# Altium footprint library Connector Power.PcbLib: 83 footprints (part 2 of 6)
Each footprint in its own frame and in the unit in brackets; x right, y up, seen from the top. Pads: shape width x height; smd on the part's side, far side on the other; paste and mask are expansions set on the pad; w line width, h text height; cw(c..) or ccw(c..) is an arc to the next point about the centre after c.
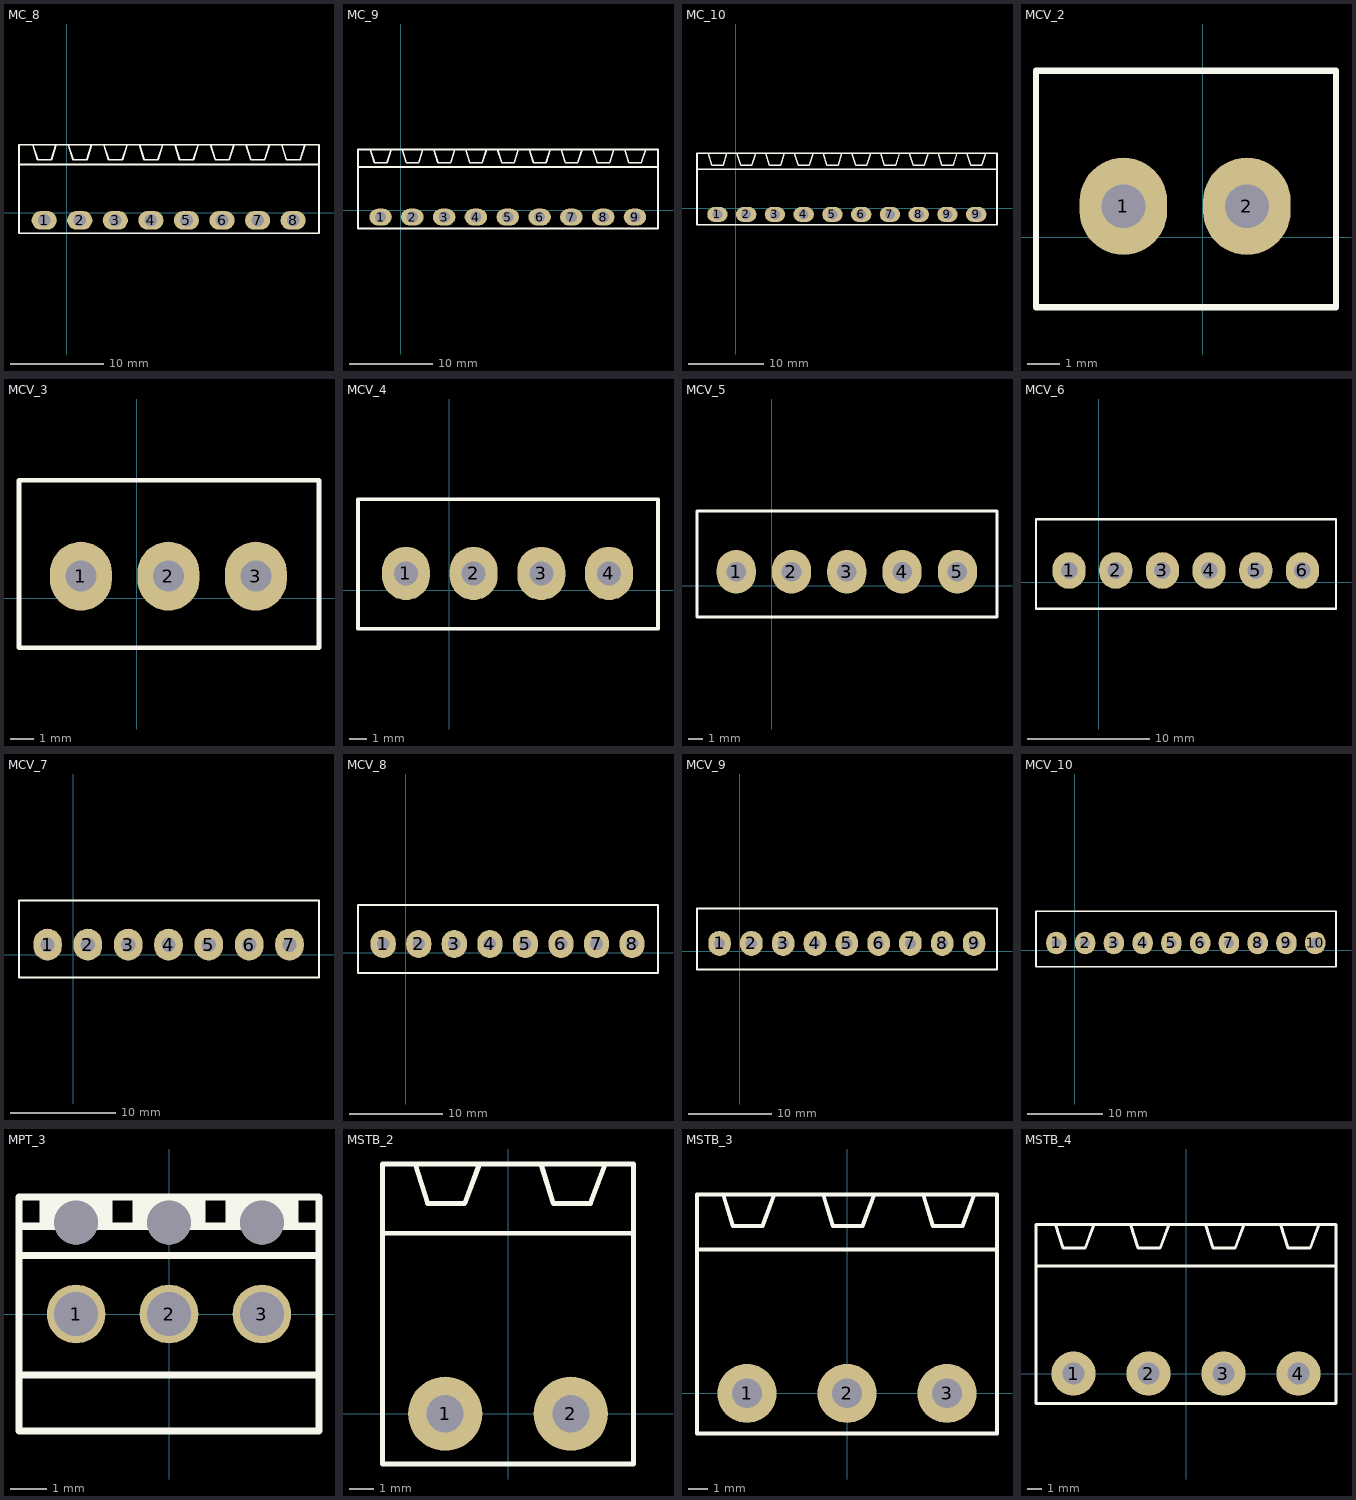
[diagram p1: the footprints below, top view; thin cyan lines are the x and y axes]

## MC_8 [mm] "PHOENIX MC 1.5/8-GF-3.81"
pads (8):
  oval 2.7x2 hole 1.35: 1(-2.44,-0.8) 2(1.37,-0.8) 3(5.18,-0.8) 4(8.99,-0.8) 5(12.8,-0.8) 6(16.61,-0.8) 7(20.42,-0.8) 8(24.23,-0.8)
Top Overlay:
  lines w0.2: -5.08,5.2 26.99,5.2 ; -3.67,7.3 -3.17,5.7 -1.67,5.7 -1.17,7.3 ; 0.14,7.3 0.64,5.7 2.14,5.7 2.64,7.3 ; 3.95,7.3 4.45,5.7 5.95,5.7 6.45,7.3 ; 7.76,7.3 8.26,5.7 9.76,5.7 10.26,7.3 ; 11.57,7.3 12.07,5.7 13.57,5.7 14.07,7.3 ; 15.38,7.3 15.88,5.7 17.38,5.7 17.88,7.3 ; 19.19,7.3 19.69,5.7 21.19,5.7 21.69,7.3 ; 23,7.3 23.5,5.7 25,5.7 25.5,7.3 ; -5.14,-2.18 27,-2.18 27,7.3 -5.14,7.3 -5.14,-2.18
3D body "User Library-1803277.STEP": height 7.35, standoff -3.3, extent 10.235,-2.1 19.245,7.2
3D body "User Library-1803277.STEP": height 7.35, standoff -3.3, extent -1.195,-2.1 7.815,7.2
3D body "User Library-1803277.STEP": height 7.35, standoff -3.3, extent -5.005,-2.1 4.005,7.2
3D body "User Library-1803277.STEP": height 7.35, standoff -3.3, extent 2.615,-2.1 11.625,7.2
3D body "User Library-1803277.STEP": height 7.35, standoff -3.3, extent 6.425,-2.1 15.435,7.2
3D body "User Library-1803277.STEP": height 7.35, standoff -3.3, extent 14.045,-2.1 23.055,7.2
3D body "User Library-1803277.STEP": height 7.35, standoff -3.3, extent 17.855,-2.1 26.865,7.2

## MC_9 [mm] "PHOENIX MC 1.5/9-GF-3.81"
pads (9):
  oval 2.7x2 hole 1.35: 1(-2.44,-0.8) 2(1.37,-0.8) 3(5.18,-0.8) 4(8.99,-0.8) 5(12.8,-0.8) 6(16.61,-0.8) 7(20.42,-0.8) 8(24.23,-0.8) 9(28.04,-0.8)
Top Overlay:
  lines w0.2: -5.08,5.2 30.79,5.2 ; -3.67,7.3 -3.17,5.7 -1.67,5.7 -1.17,7.3 ; 0.14,7.3 0.64,5.7 2.14,5.7 2.64,7.3 ; 3.95,7.3 4.45,5.7 5.95,5.7 6.45,7.3 ; 7.76,7.3 8.26,5.7 9.76,5.7 10.26,7.3 ; 11.57,7.3 12.07,5.7 13.57,5.7 14.07,7.3 ; 15.38,7.3 15.88,5.7 17.38,5.7 17.88,7.3 ; 19.19,7.3 19.69,5.7 21.19,5.7 21.69,7.3 ; 23,7.3 23.5,5.7 25,5.7 25.5,7.3 ; 26.81,7.3 27.31,5.7 28.81,5.7 29.31,7.3 ; -5.14,-2.18 -5.14,7.3 30.8,7.3 30.8,-2.18 -5.14,-2.18
3D body "User Library-1803277.STEP": height 7.35, standoff -3.3, extent 17.855,-2.1 26.865,7.2
3D body "User Library-1803277.STEP": height 7.35, standoff -3.3, extent 14.045,-2.1 23.055,7.2
3D body "User Library-1803277.STEP": height 7.35, standoff -3.3, extent 6.425,-2.1 15.435,7.2
3D body "User Library-1803277.STEP": height 7.35, standoff -3.3, extent 2.615,-2.1 11.625,7.2
3D body "User Library-1803277.STEP": height 7.35, standoff -3.3, extent -5.005,-2.1 4.005,7.2
3D body "User Library-1803277.STEP": height 7.35, standoff -3.3, extent -1.195,-2.1 7.815,7.2
3D body "User Library-1803277.STEP": height 7.35, standoff -3.3, extent 10.235,-2.1 19.245,7.2
3D body "User Library-1803277.STEP": height 7.35, standoff -3.3, extent 21.665,-2.1 30.675,7.2

## MC_10 [mm] "PHOENIX MC 1.5/10-GF-3.81"
pads (10):
  oval 2.7x2 hole 1.35: 1(-2.44,-0.8) 2(1.37,-0.8) 3(5.18,-0.8) 4(8.99,-0.8) 5(12.8,-0.8) 6(16.61,-0.8) 7(20.42,-0.8) 8(24.23,-0.8) 9(28.04,-0.8) 9(31.85,-0.8)
Top Overlay:
  lines w0.2: -5.08,5.2 34.6,5.2 ; -3.67,7.3 -3.17,5.7 -1.67,5.7 -1.17,7.3 ; 0.14,7.3 0.64,5.7 2.14,5.7 2.64,7.3 ; 3.95,7.3 4.45,5.7 5.95,5.7 6.45,7.3 ; 7.76,7.3 8.26,5.7 9.76,5.7 10.26,7.3 ; 11.57,7.3 12.07,5.7 13.57,5.7 14.07,7.3 ; 15.38,7.3 15.88,5.7 17.38,5.7 17.88,7.3 ; 19.19,7.3 19.69,5.7 21.19,5.7 21.69,7.3 ; 23,7.3 23.5,5.7 25,5.7 25.5,7.3 ; 26.81,7.3 27.31,5.7 28.81,5.7 29.31,7.3 ; 30.62,7.3 31.12,5.7 32.62,5.7 33.12,7.3 ; -5.14,-2.18 34.61,-2.18 34.61,7.3 -5.14,7.3 -5.14,-2.18
3D body "User Library-1803277.STEP": height 7.35, standoff -3.3, extent 21.665,-2.1 30.675,7.2
3D body "User Library-1803277.STEP": height 7.35, standoff -3.3, extent 10.235,-2.1 19.245,7.2
3D body "User Library-1803277.STEP": height 7.35, standoff -3.3, extent -1.195,-2.1 7.815,7.2
3D body "User Library-1803277.STEP": height 7.35, standoff -3.3, extent -5.005,-2.1 4.005,7.2
3D body "User Library-1803277.STEP": height 7.35, standoff -3.3, extent 2.615,-2.1 11.625,7.2
3D body "User Library-1803277.STEP": height 7.35, standoff -3.3, extent 6.425,-2.1 15.435,7.2
3D body "User Library-1803277.STEP": height 7.35, standoff -3.3, extent 14.045,-2.1 23.055,7.2
3D body "User Library-1803277.STEP": height 7.35, standoff -3.3, extent 17.855,-2.1 26.865,7.2
3D body "User Library-1803277.STEP": height 7.35, standoff -3.3, extent 25.475,-2.1 34.485,7.2

## MCV_2 [mm] "PHOENIX MCV 1.5/2-GF-3.81"
pads (2):
  oval 2.7x3 hole 1.35: 1(-2.44,0.96) 2(1.37,0.96)
Top Overlay:
  lines w0.2: -5.14,-2.16 -5.14,5.14 4.12,5.14 4.12,-2.16 -5.14,-2.16
3D body "User Library-CO2-3_81.STEP": height 9.3, standoff -3.3, extent -5.02,-2.04 3.99,5.21

## MCV_3 [mm] "PHOENIX MCV 1.5/3-GF-3.81"
pads (3):
  oval 2.7x3 hole 1.35: 1(-2.44,0.96) 2(1.37,0.96) 3(5.18,0.96)
Top Overlay:
  lines w0.2: -5.14,-2.16 7.93,-2.16 7.93,5.14 -5.14,5.14 -5.14,-2.16
3D body "User Library-CO2-3_81.STEP": height 9.3, standoff -3.3, extent -5.02,-2.04 3.99,5.21
3D body "User Library-CO2-3_81.STEP": height 9.3, standoff -3.3, extent -1.21,-2.04 7.8,5.21

## MCV_4 [mm] "PHOENIX MCV 1.5/4-GF-3.81"
pads (4):
  oval 2.7x3 hole 1.35: 1(-2.44,0.96) 2(1.37,0.96) 3(5.18,0.96) 4(8.99,0.96)
Top Overlay:
  lines w0.2: -5.14,-2.16 -5.14,5.14 11.75,5.14 11.75,-2.16 -5.14,-2.16
3D body "User Library-CO2-3_81.STEP": height 9.3, standoff -3.3, extent -1.21,-2.04 7.8,5.21
3D body "User Library-CO2-3_81.STEP": height 9.3, standoff -3.3, extent -5.02,-2.04 3.99,5.21
3D body "User Library-CO2-3_81.STEP": height 9.3, standoff -3.3, extent 2.6,-2.04 11.61,5.21

## MCV_5 [mm] "PHOENIX MCV 1.5/5-GF-3.81"
pads (5):
  oval 2.7x3 hole 1.35: 1(-2.44,0.96) 2(1.37,0.96) 3(5.18,0.96) 4(8.99,0.96) 5(12.8,0.96)
Top Overlay:
  lines w0.2: -5.14,-2.16 -5.14,5.14 15.53,5.14 15.53,-2.16 -5.14,-2.16
3D body "User Library-CO2-3_81.STEP": height 9.3, standoff -3.3, extent 6.41,-2.04 15.42,5.21
3D body "User Library-CO2-3_81.STEP": height 9.3, standoff -3.3, extent -1.21,-2.04 7.8,5.21
3D body "User Library-CO2-3_81.STEP": height 9.3, standoff -3.3, extent -5.02,-2.04 3.99,5.21
3D body "User Library-CO2-3_81.STEP": height 9.3, standoff -3.3, extent 2.6,-2.04 11.61,5.21

## MCV_6 [mm] "PHOENIX MCV 1.5/6-GF-3.81"
pads (6):
  oval 2.7x3 hole 1.35: 1(-2.44,0.96) 2(1.37,0.96) 3(5.18,0.96) 4(8.99,0.96) 5(12.8,0.96) 6(16.61,0.96)
Top Overlay:
  lines w0.2: -5.14,-2.16 -5.14,5.14 19.35,5.14 19.35,-2.16 -5.14,-2.16
3D body "User Library-CO2-3_81.STEP": height 9.3, standoff -3.3, extent 10.22,-2.04 19.23,5.21
3D body "User Library-CO2-3_81.STEP": height 9.3, standoff -3.3, extent 6.41,-2.04 15.42,5.21
3D body "User Library-CO2-3_81.STEP": height 9.3, standoff -3.3, extent -1.21,-2.04 7.8,5.21
3D body "User Library-CO2-3_81.STEP": height 9.3, standoff -3.3, extent -5.02,-2.04 3.99,5.21
3D body "User Library-CO2-3_81.STEP": height 9.3, standoff -3.3, extent 2.6,-2.04 11.61,5.21

## MCV_7 [mm] "PHOENIX MCV 1.5/7-GF-3.81"
pads (7):
  oval 2.7x3 hole 1.35: 1(-2.44,0.96) 2(1.37,0.96) 3(5.18,0.96) 4(8.99,0.96) 5(12.8,0.96) 6(16.61,0.96) 7(20.42,0.96)
Top Overlay:
  lines w0.2: -5.14,-2.16 23.21,-2.16 23.21,5.14 -5.14,5.14 -5.14,-2.16
3D body "User Library-CO2-3_81.STEP": height 9.3, standoff -3.3, extent 2.6,-2.04 11.61,5.21
3D body "User Library-CO2-3_81.STEP": height 9.3, standoff -3.3, extent -5.02,-2.04 3.99,5.21
3D body "User Library-CO2-3_81.STEP": height 9.3, standoff -3.3, extent -1.21,-2.04 7.8,5.21
3D body "User Library-CO2-3_81.STEP": height 9.3, standoff -3.3, extent 6.41,-2.04 15.42,5.21
3D body "User Library-CO2-3_81.STEP": height 9.3, standoff -3.3, extent 10.22,-2.04 19.23,5.21
3D body "User Library-CO2-3_81.STEP": height 9.3, standoff -3.3, extent 14.03,-2.04 23.04,5.21

## MCV_8 [mm] "PHOENIX MCV 1.5/8-GF-3.81"
pads (8):
  oval 2.7x3 hole 1.35: 1(-2.44,0.96) 2(1.37,0.96) 3(5.18,0.96) 4(8.99,0.96) 5(12.8,0.96) 6(16.61,0.96) 7(20.42,0.96) 8(24.23,0.96)
Top Overlay:
  lines w0.2: -5.14,-2.16 -5.14,5.14 27.01,5.14 27.01,-2.16 -5.14,-2.16
3D body "User Library-CO2-3_81.STEP": height 9.3, standoff -3.3, extent 14.03,-2.04 23.04,5.21
3D body "User Library-CO2-3_81.STEP": height 9.3, standoff -3.3, extent 10.22,-2.04 19.23,5.21
3D body "User Library-CO2-3_81.STEP": height 9.3, standoff -3.3, extent 6.41,-2.04 15.42,5.21
3D body "User Library-CO2-3_81.STEP": height 9.3, standoff -3.3, extent -1.21,-2.04 7.8,5.21
3D body "User Library-CO2-3_81.STEP": height 9.3, standoff -3.3, extent -5.02,-2.04 3.99,5.21
3D body "User Library-CO2-3_81.STEP": height 9.3, standoff -3.3, extent 2.6,-2.04 11.61,5.21
3D body "User Library-CO2-3_81.STEP": height 9.3, standoff -3.3, extent 17.84,-2.04 26.85,5.21

## MCV_9 [mm] "PHOENIX MCV 1.5/9-GF-3.81"
pads (9):
  oval 2.7x3 hole 1.35: 1(-2.44,0.96) 2(1.37,0.96) 3(5.18,0.96) 4(8.99,0.96) 5(12.8,0.96) 6(16.61,0.96) 7(20.42,0.96) 8(24.23,0.96) 9(28.04,0.96)
Top Overlay:
  lines w0.2: -5.14,-2.16 -5.14,5.14 30.79,5.14 30.79,-2.16 -5.14,-2.16
3D body "User Library-CO2-3_81.STEP": height 9.3, standoff -3.3, extent 21.65,-2.04 30.66,5.21
3D body "User Library-CO2-3_81.STEP": height 9.3, standoff -3.3, extent 14.03,-2.04 23.04,5.21
3D body "User Library-CO2-3_81.STEP": height 9.3, standoff -3.3, extent 10.22,-2.04 19.23,5.21
3D body "User Library-CO2-3_81.STEP": height 9.3, standoff -3.3, extent 6.41,-2.04 15.42,5.21
3D body "User Library-CO2-3_81.STEP": height 9.3, standoff -3.3, extent -1.21,-2.04 7.8,5.21
3D body "User Library-CO2-3_81.STEP": height 9.3, standoff -3.3, extent -5.02,-2.04 3.99,5.21
3D body "User Library-CO2-3_81.STEP": height 9.3, standoff -3.3, extent 2.6,-2.04 11.61,5.21
3D body "User Library-CO2-3_81.STEP": height 9.3, standoff -3.3, extent 17.84,-2.04 26.85,5.21

## MCV_10 [mm] "PHOENIX MCV 1.5/10-GF-3.81"
pads (10):
  oval 2.7x3 hole 1.35: 1(-2.44,0.96) 2(1.37,0.96) 3(5.18,0.96) 4(8.99,0.96) 5(12.8,0.96) 6(16.61,0.96) 7(20.42,0.96) 8(24.23,0.96) 9(28.04,0.96) 10(31.85,0.96)
Top Overlay:
  lines w0.2: -5.14,-2.16 34.61,-2.16 34.61,5.14 -5.14,5.14 -5.14,-2.16
3D body "User Library-CO2-3_81.STEP": height 9.3, standoff -3.3, extent 17.84,-2.04 26.85,5.21
3D body "User Library-CO2-3_81.STEP": height 9.3, standoff -3.3, extent 2.6,-2.04 11.61,5.21
3D body "User Library-CO2-3_81.STEP": height 9.3, standoff -3.3, extent -5.02,-2.04 3.99,5.21
3D body "User Library-CO2-3_81.STEP": height 9.3, standoff -3.3, extent -1.21,-2.04 7.8,5.21
3D body "User Library-CO2-3_81.STEP": height 9.3, standoff -3.3, extent 6.41,-2.04 15.42,5.21
3D body "User Library-CO2-3_81.STEP": height 9.3, standoff -3.3, extent 10.22,-2.04 19.23,5.21
3D body "User Library-CO2-3_81.STEP": height 9.3, standoff -3.3, extent 14.03,-2.04 23.04,5.21
3D body "User Library-CO2-3_81.STEP": height 9.3, standoff -3.3, extent 21.65,-2.04 30.66,5.21
3D body "User Library-CO2-3_81.STEP": height 9.3, standoff -3.3, extent 25.46,-2.04 34.47,5.21

## MPT_3 [mm] "PHOENIX MPT, 2.54mm pitch, 3pin"
pads (6):
  round 1.6 / inner oval 2x3 / far side oval 2x3 hole 1.2: 1(-2.54,0) 2(0,0) 3(2.54,0)
  round 1.2 hole 1.2 unplated: ""(-2.54,2.5) ""(0,2.5) ""(2.54,2.5)
Top Overlay:
  rectangle: 1.54,2.4 3.54,3.2
  rectangle: -3.54,2.4 -1.54,3.2
  rectangle: -1,2.4 1,3.2
  lines w0.2: -4.1,1.6 4.1,1.6 ; -4.1,2.4 4.1,2.4 ; -4.08,-1.668 4.1,-1.668 ; -4.1,-3.2 4.1,-3.2 4.1,3.2 -4.1,3.2 -4.1,-3.2
3D body "pxc_1725669_05_MPT-0-5-3-2-54_3D.stp": height 8.7, standoff -3.3, extent -4.04,-3.1 4.04,3.1

## MSTB_2 [mm] "PHOENIX MSTB 2.5/2-GF-5.08"
pads (2):
  round 3 hole 1.5: 1(-2.54,0) 2(2.54,0)
Top Overlay:
  lines w0.2: -5.08,7.3 5.08,7.3 ; -3.75,10.1 -3.25,8.5 -1.75,8.5 -1.15,10.1 ; 1.33,10.1 1.83,8.5 3.33,8.5 3.93,10.1 ; -5.08,-2.032 -5.08,10.1 5.08,10.1 5.08,-2.032 -5.08,-2.032
3D body "PHOENIX_MSTB2.stp": height 8.7, standoff -3.4, extent -5,-2 5,10

## MSTB_3 [mm] "PHOENIX MSTB 2.5/3-GF-5.08"
pads (3):
  round 3 hole 1.5: 1(-5.08,0) 2(0,0) 3(5.08,0)
Top Overlay:
  lines w0.2: -7.62,7.3 7.62,7.3 ; -6.29,10.1 -5.79,8.5 -4.29,8.5 -3.69,10.1 ; -1.21,10.1 -0.71,8.5 0.79,8.5 1.39,10.1 ; 3.87,10.1 4.37,8.5 5.87,8.5 6.47,10.1 ; -7.62,-2.032 -7.62,10.1 7.62,10.1 7.62,-2.032 -7.62,-2.032
3D body "PHOENIX_MSTB3.stp": height 8.6, standoff -3.5, extent -7.5,-2 7.5,10

## MSTB_4 [mm] "PHOENIX MSTB 2.5/4-GF-5.08"
pads (4):
  round 3 hole 1.5: 1(-7.62,0) 2(-2.54,0) 3(2.54,0) 4(7.62,0)
Top Overlay:
  lines w0.2: -10.16,7.3 10.16,7.3 ; -8.83,10.1 -8.33,8.5 -6.83,8.5 -6.23,10.1 ; -3.75,10.1 -3.25,8.5 -1.75,8.5 -1.15,10.1 ; 1.33,10.1 1.83,8.5 3.33,8.5 3.93,10.1 ; 6.41,10.1 6.91,8.5 8.41,8.5 9.01,10.1 ; -10.16,-2.032 -10.16,10.1 10.16,10.1 10.16,-2.032 -10.16,-2.032
3D body "PHOENIX_MSTB4.stp": height 8.6, standoff -3.5, extent -10,-2 10,10